# Altium schematic symbol library 1757271.SchLib: 1 symbol
Pins are listed as number, name and electrical type; pins without a type are passive.

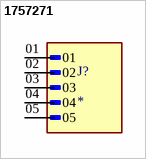
[diagram p0: symbol 1757271]

## 1757271
designator J?
Pluggable Header 5.08mm 12AWG 320V 12A 5 Position COMBICON MSTBA Series | Phoenix Contact 1757271; SnapEDA_Link: https://www.snapeda.com/parts/1757271/Phoenix+Contact/view-part/?ref=snap; Package: None; Value: *; MF: Phoenix Contact; MP: 1757271; Check_prices: https://www.snapeda.com/parts/1757271/Phoenix+Contact/view-part/?ref=eda
footprint PHOENIX_1757271
pins: 01, 02, 03, 04, 05